# EAGLE library part DISP_TFT20_HT020SQV003NS (library dp_devices.v6)
2.0" TFT display
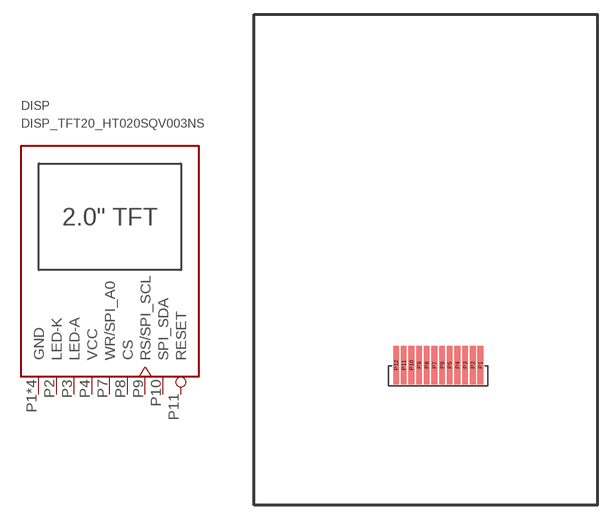
[diagram p209: symbol with the pads of HT020SQV003NS; footprint HT020SQV003NS]

Designator prefix DISP

## DISP_TFT20_HT020SQV003NS  [HT020SQV003NS]
P1  GND  pwr
P2  LED-K  pwr
P3  LED-A  pwr
P4  VCC  pwr
P5  GND  pwr
P6  GND  pwr
P7  WR/SPI_A0  in
P8  CS  in
P9  RS/SPI_SCL  in
P10  SPI_SDA
P11  RESET  in
P12  GND  pwr

## Footprint HT020SQV003NS (pad centres in mm)
smd 0.6 x 4: P1 5.7,-11; P2 4.9,-11; P3 4.1,-11; P4 3.3,-11; P5 2.5,-11; P6 1.7,-11; P7 0.9,-11; P8 0.1,-11; P9 -0.7,-11; P10 -1.5,-11; P11 -2.3,-11; P12 -3.1,-11